# EAGLE library part 6100XX18321_61000618321 (library WR-PHD)
WR-PHD 2.54 mm SMT Pin Header Article Properties Pins 4 unitless; 6 unitless; 10 unitless; 14 unitless; 15 unitless; 16 unitless; 24 unitless; 32 unitless; 34 unitless; 36 unitless General Information General Information Operating Temperature -40 °C up to +105 °C; -40 °C up to +125 °C Compliance Lead free / RoHS Pitch 2.54 mm Durability 25 Mating cycles Rows Single Gender Pin Header Type Straight Type 1; Straight Type 2 Material Properties Insulator Material PA6T Insulator Flammability Rating UL94 V-0 Contact Material Copper Alloy Contact Plating Gold Contact Type Stamped Certification UL Approval E323964 Packaging Properties Packaging Tube Electrical Properties IR 3 A Withstanding Voltage 500 V (AC) Contact Resistance 20 mΩ RISO 1000 MΩ <https://www.we-online.com/components/media/o33202v209%20Family_WR-PHD_6100xx18221.jpg> Details see: www.we-online.com/en/components/products/PHD_2_54_SMT_PIN_HEADER_6100XX18X21 <www.we-online.com/catalog/PHD_2_54_SMT_PIN_HEADER_6100XX18X21/?utm_source=eagle_model&utm_medium=description_link&utm_campaign=eisos_eagle> Updated by Yingchun,Shan 2019-10-18 2019 (C) Würth Elektronik
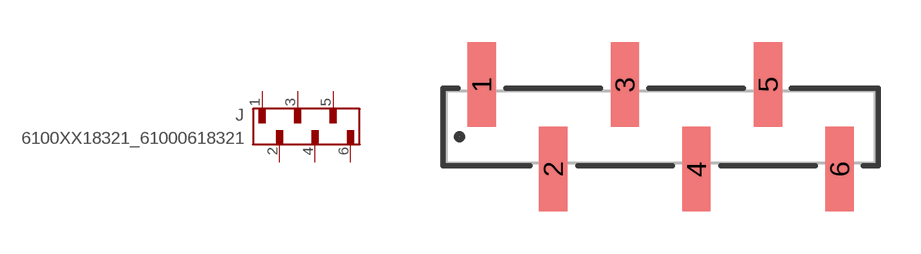
[diagram p45: symbol with the pads of 61000618321; footprint 61000618321]

Designator prefix J

## 6100XX18321_61000618321 (DATASHEET-URL: https://www.we-online.com/redexpert/spec/61000618321?ae; GENDER: Pin Header; IR: 3A; MOUNT: SMT; PACKAGING: Tube; PART-NUMBER: 61000618321; PINS: 6; PITCH: 2.54 mm; ROWS: Single; TYPE: Straight Type 2; VALUE: 61000618321)  [61000618321]
1  1  pas
2  2  pas
3  3  pas
4  4  pas
5  5  pas
6  6  pas

## Footprint 61000618321 (pad centres in mm)
WR-PHD 2.54 mm SMT Pin Headerr, 6 Pins
smd 1 x 3: 1 -6.35,1.5; 2 -3.81,-1.5; 3 -1.27,1.5; 4 1.27,-1.5; 5 3.81,1.5; 6 6.35,-1.5